# Altium footprint library Universal resistor SMD.PcbLib: 1 footprints
Each footprint in its own frame and in the unit in brackets; x right, y up, seen from the top. Pads: shape width x height; smd on the part's side, far side on the other; paste and mask are expansions set on the pad; w line width, h text height; cw(c..) or ccw(c..) is an arc to the next point about the centre after c.
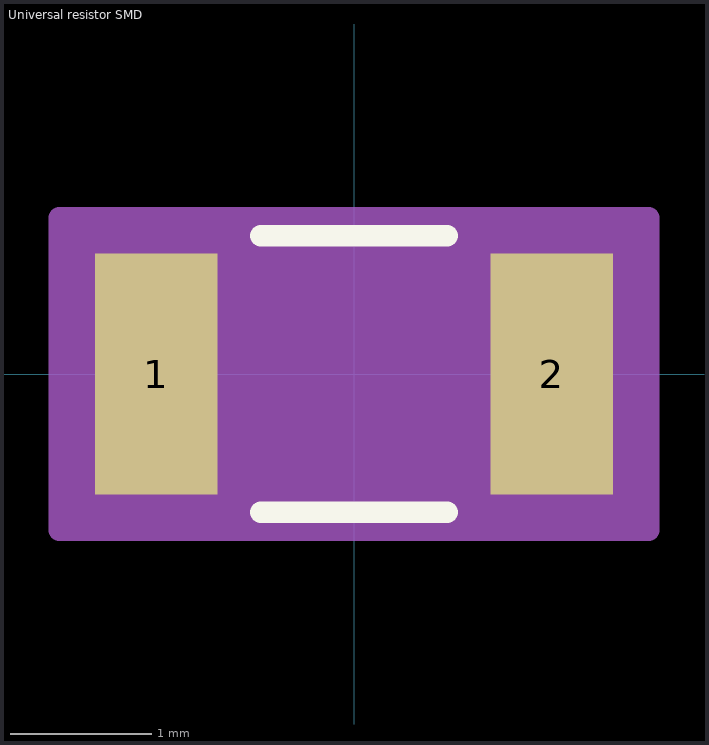
[diagram p0: the footprint, top view; thin cyan lines are the x and y axes]

## Universal resistor SMD [mil]
pads (2):
  rect 34x67 smd paste+0 mask+0: 1(-55,0) 2(55,0)
Top Overlay:
  lines w6: -25.89,-38.5 25.89,-38.5 ; -25.89,38.5 25.89,38.5
Mechanical 13:
  lines w1: -64,-33.5 -64,33.5 ; -64,-33.5 64,-33.5 ; -64,-33.5 -38,-33.5 -38,33.5 -64,33.5 ; -64,-33.5 -64,33.5 ; -64,33.5 64,33.5 ; 64,-33.5 64,33.5 ; 64,-33.5 64,33.5 ; 64,-33.5 38,-33.5 38,33.5 64,33.5
Mechanical 15:
  region: 82,-43.5 -82,-43.5 -82,43.5 82,43.5
  lines w6: -82,-43.5 82,-43.5 82,43.5 -82,43.5 -82,-43.5
3D body "RES1206_CRG_TYCO_TYC.step": height 25.98, standoff 0, extent -64.02,-33.5 64.02,33.5